# Altium schematic symbol library EasyLib.SchLib: 71 symbols
Pins are listed as number, name and electrical type; pins without a type are passive.

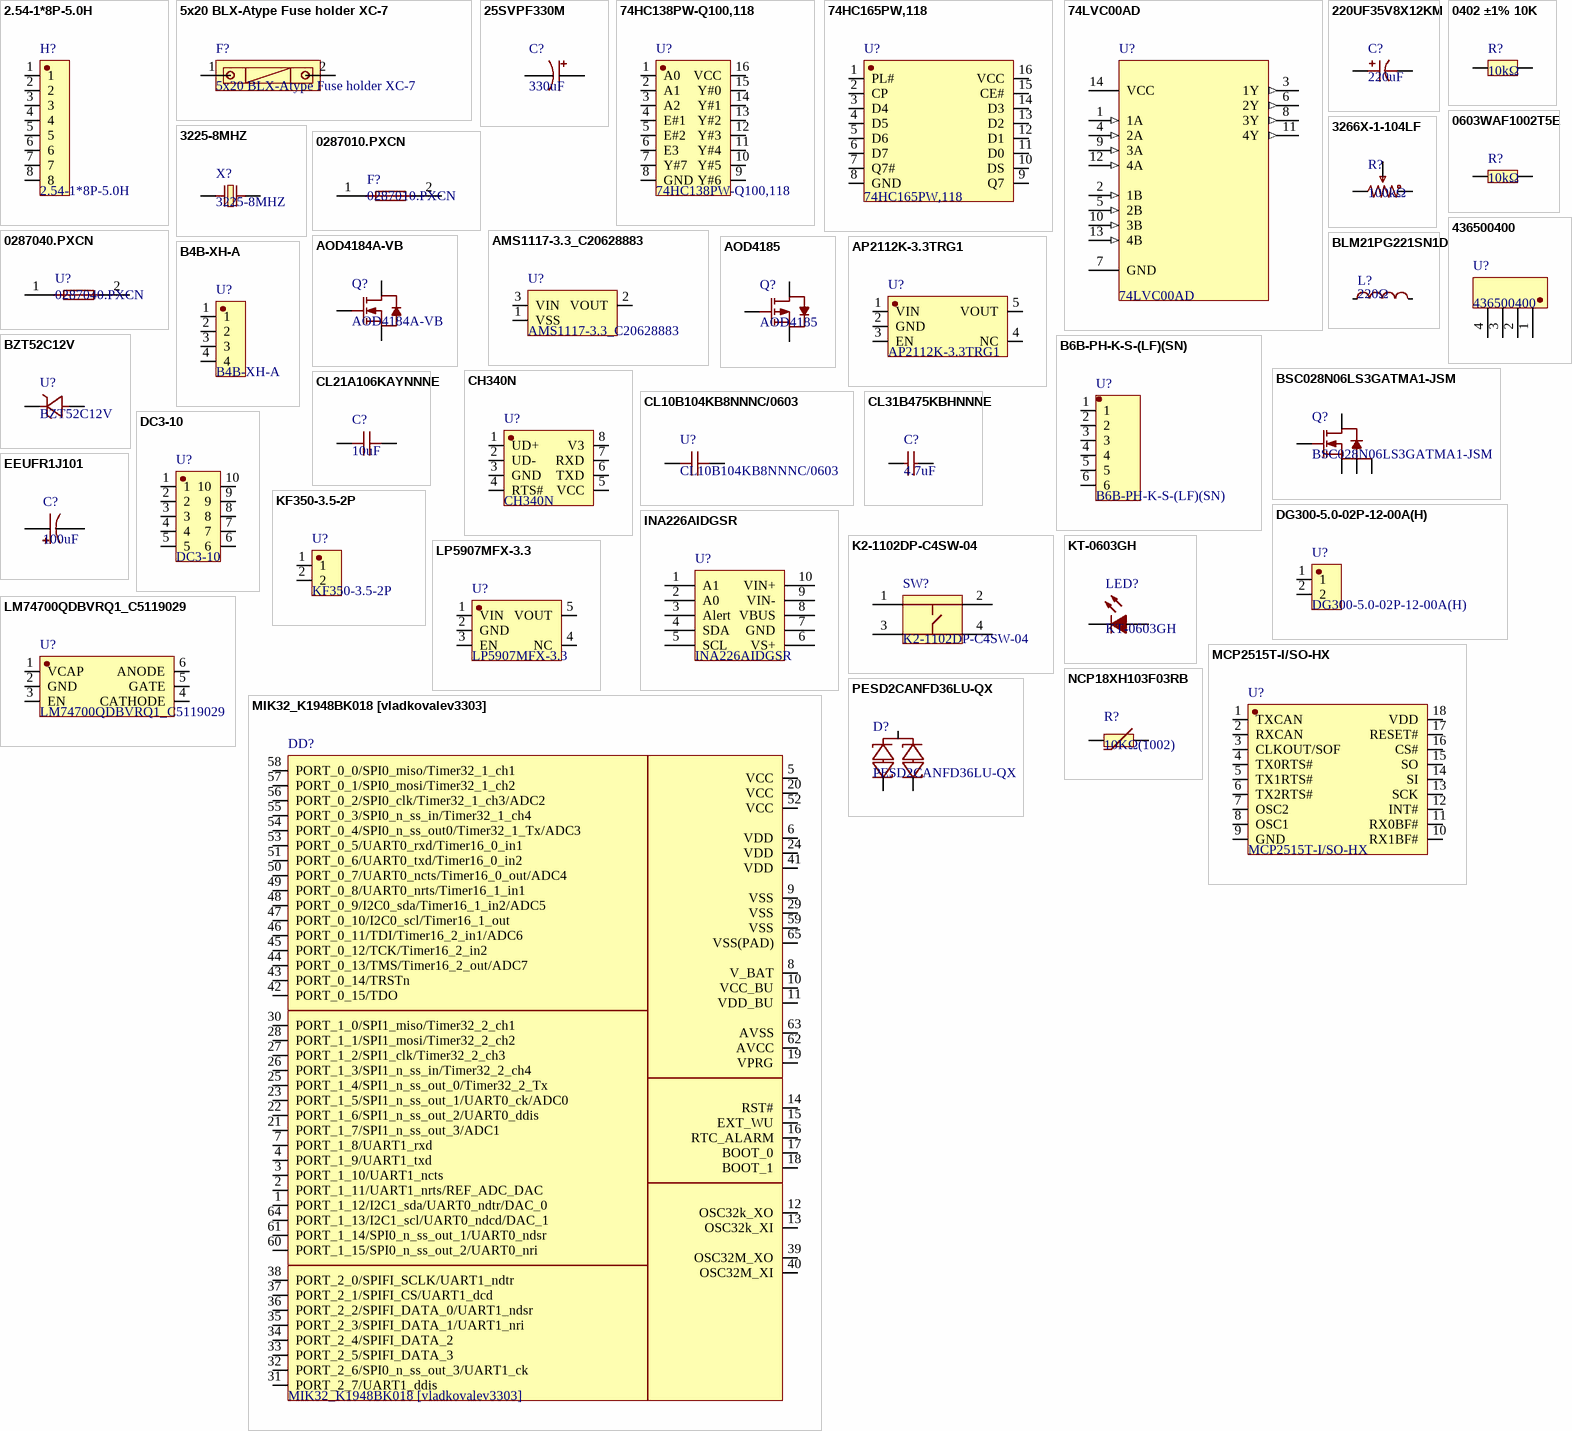
[diagram p0: symbols 2.54-1*8P-5.0H to PESD2CANFD36LU-QX]

## 2.54-1*8P-5.0H
designator H?
Manufacturer: BOOMELE; Manufacturer Part Number: 2.54-1*8P 5.0H; LCSC Part: C3014686; Supplier: LCSC; Supplier Part Number: C3014686; JLCPCB Part Class: Extended Part; Datasheet: https://www.lcsc.com/datasheet/C3014686.pdf; Source: JLCEDA/EasyEDA Official Library (https://easyeda.com, https://lceda.cn)
footprint HDR-TH_8P-P2.54-V-F-H5.0 (Footprint)
pins: 1, 2, 3, 4, 5, 6, 7, 8

## 5x20 BLX-Atype Fuse holder XC-7
designator F?
5x20 BLX-; Manufacturer: xcfuse; Manufacturer Part Number: 5x20 BLX-A XC-7; LCSC Part: C3131; Supplier: LCSC; Supplier Part Number: C3131; JLCPCB Part Class: Extended Part; Datasheet: https://www.lcsc.com/datasheet/C3131.pdf; LCSC URL: https://lcsc.com/product-detail/Fuseholders_5x20-BLX-Fuse-holder_C3131.html; Source: JLCEDA/EasyEDA Official Library (https://easyeda.com, https://lceda.cn)
footprint FUSE-TH_L22.6-W9.0 (Footprint)
pins: 1, 2

## 25SVPF330M
designator C?, comment 330uF
Manufacturer: PANASONIC; Manufacturer Part Number: 25SVPF330M; Value: 330uF; LCSC Part: C178367; Supplier: LCSC; Supplier Part Number: C178367; JLCPCB Part Class: Extended Part; Datasheet: https://www.lcsc.com/datasheet/C178367.pdf; LCSC URL: https://lcsc.com/product-detail/Solid-Polymer-Electrolytic-Capacitor_PANASONIC_25SVPF330M_330uF-25V_C178367.html; Source: JLCEDA/EasyEDA Official Library (https://easyeda.com, https://lceda.cn)
footprint CAP-SMD_BD10.0-L10.3-W10.3-LS11.0-FD (Footprint)
pins: 1, 2

## 74HC138PW-Q100,118
designator U?
Manufacturer: Nexperia; Manufacturer Part Number: 74HC138PW-Q100,118; LCSC Part: C546575; Supplier: LCSC; Supplier Part Number: C546575; JLCPCB Part Class: Extended Part; Datasheet: https://www.lcsc.com/datasheet/C546575.pdf; LCSC URL: https://lcsc.com/product-detail/presales_Nexperia-74HC138PW-Q100-118_C546575.html; Source: JLCEDA/EasyEDA Official Library (https://easyeda.com, https://lceda.cn)
footprint TSSOP-16_L5.0-W4.4-P0.65-LS6.4-BL (Footprint)
pins: 1 A0, 2 A1, 3 A2, 4 E#1, 5 E#2, 6 E3, 7 Y#7, 8 GND, 9 Y#6, 10 Y#5, 11 Y#4, 12 Y#3, 13 Y#2, 14 Y#1, 15 Y#0, 16 VCC

## 74HC165PW,118
designator U?
Manufacturer: Nexperia; Manufacturer Part Number: 74HC165PW,118; LCSC Part: C80696; Supplier: LCSC; Supplier Part Number: C80696; JLCPCB Part Class: Extended Part; Datasheet: https://www.lcsc.com/datasheet/C80696.pdf; LCSC URL: https://lcsc.com/product-detail/74-Series_NXP_74HC165PW_74HC165PW_C80696.html; Source: JLCEDA/EasyEDA Official Library (https://easyeda.com, https://lceda.cn)
footprint TSSOP-16_L5.0-W4.4-P0.65-LS6.4-BL (Footprint)
pins: 1 PL#, 2 CP, 3 D4, 4 D5, 5 D6, 6 D7, 7 Q7#, 8 GND, 9 Q7, 10 DS, 11 D0, 12 D1, 13 D2, 14 D3, 15 CE#, 16 VCC

## 74LVC00AD
designator U?
NAND Gate IC 4 Channel  14-SO; Manufacturer: NXP Semiconductors; Source: SnapEDA, imported from 74LVC00AD.zip; Manufacturer Part Number: 74LVC00AD; Datasheet: https://s3.amazonaws.com/snapeda/datasheet/74LVC00AD_NXP_Semiconductors.pdf
footprint SOIC127P600X175-14N (Footprint)
pins: 1 1A (in), 2 1B (in), 3 1Y (out), 4 2A (in), 5 2B (in), 6 2Y (out), 7 GND, 8 3Y (out), 9 3A (in), 10 3B (in), 11 4Y (out), 12 4A (in), 13 4B (in), 14 VCC (power)

## 220UF35V8X12KM
designator C?, comment 220uF
Manufacturer: Econd; Manufacturer Part Number: 220uF35V8x12KM; Value: 220uF; LCSC Part: C49304872; Supplier: LCSC; Supplier Part Number: C49304872; JLCPCB Part Class: Extended Part; Datasheet: https://www.lcsc.com/datasheet/C49304872.pdf; Source: JLCEDA/EasyEDA Official Library (https://easyeda.com, https://lceda.cn)
footprint CAP-TH_BD8.0-P3.50-D0.5-FD (Footprint)
pins: 1, 2

## 0402 ±1% 10K
designator R?, comment 10kΩ
Manufacturer: VO; Manufacturer Part Number: 0402 ±1% 10K; Value: 10kΩ; LCSC Part: C2889342; Supplier: LCSC; Supplier Part Number: C2889342; JLCPCB Part Class: Extended Part; Datasheet: https://www.lcsc.com/datasheet/C2889342.pdf; Source: JLCEDA/EasyEDA Official Library (https://easyeda.com, https://lceda.cn)
footprint R0402 (Footprint)
pins: 1, 2

## 0603WAF1002T5E
designator R?, comment 10kΩ
10KOhm (1002) ±1%; Manufacturer: UNI-ROYAL; Manufacturer Part Number: 0603WAF1002T5E; Value: 10kΩ; LCSC Part: C25804; Supplier: LCSC; Supplier Part Number: C25804; JLCPCB Part Class: Basic Part; Datasheet: https://www.lcsc.com/datasheet/C25804.pdf; LCSC URL: https://lcsc.com/product-detail/Chip-Resistor-Surface-Mount-UniOhm_10KR-1002-1_C25804.html; Source: JLCEDA/EasyEDA Official Library (https://easyeda.com, https://lceda.cn)
footprint R0603 (Footprint)
pins: 1, 2

## 3225-8MHZ
designator X?
Manufacturer Part Number: 3225-8MHz; LCSC Part: C9900007658; Supplier: LCSC; Supplier Part Number: C9900007658; JLCPCB Part Class: Extended Part; Datasheet: https://www.lcsc.com/datasheet/C9900007658.pdf; Source: JLCEDA/EasyEDA Official Library (https://easyeda.com, https://lceda.cn)
footprint CRYSTAL-SMD_L3.2-W2.5_3225-8MHZ (Footprint)
pins: 1, 2

## 3266X-1-104LF
designator R?, comment 100kΩ
Manufacturer: BOURNS; Manufacturer Part Number: 3266X-1-104LF; Value: 100kΩ; LCSC Part: C75886; Supplier: LCSC; Supplier Part Number: C75886; JLCPCB Part Class: Extended Part; Datasheet: https://www.lcsc.com/datasheet/C75886.pdf; Source: JLCEDA/EasyEDA Official Library (https://easyeda.com, https://lceda.cn)
footprint RES-ADJ-TH_3266X-1-103LF (Footprint)
pins: 1, 2, 3

## 0287010.PXCN
designator F?
Manufacturer: Littelfuse; Manufacturer Part Number: 0287010.PXCN; LCSC Part: C142683; Supplier: LCSC; Supplier Part Number: C142683; JLCPCB Part Class: Extended Part; Datasheet: https://www.lcsc.com/datasheet/C142683.pdf; Source: JLCEDA/EasyEDA Official Library (https://easyeda.com, https://lceda.cn)
footprint FUSE-TH_L19.1-W5.1 (Footprint)
pins: 1, 2

## 0287040.PXCN
designator U?
Manufacturer: Littelfuse; Manufacturer Part Number: 0287040.PXCN; LCSC Part: C142687; Supplier: LCSC; Supplier Part Number: C142687; JLCPCB Part Class: Extended Part; Datasheet: https://www.lcsc.com/datasheet/C142687.pdf; Source: JLCEDA/EasyEDA Official Library (https://easyeda.com, https://lceda.cn)
footprint FUSE-TH_L19.1-W5.1 (Footprint)
pins: 1, 2

## 436500400
designator U?
Manufacturer: MOLEX; Manufacturer Part Number: 436500400; LCSC Part: C277684; Supplier: LCSC; Supplier Part Number: C277684; JLCPCB Part Class: Extended Part; Datasheet: https://www.lcsc.com/datasheet/C277684.pdf; LCSC URL: https://lcsc.com/product-detail/Others_MOLEX_436500400_MOLEX-436500400_C277684.html; Source: JLCEDA/EasyEDA Official Library (https://easyeda.com, https://lceda.cn)
footprint CONN-TH_4P-P3.00_L8.9-W15.7-EH4.7 (Footprint)
pins: 1, 2, 3, 4

## AMS1117-3.3_C20628883
designator U?
Manufacturer: FOSAN; Manufacturer Part Number: AMS1117-3.3; LCSC Part: C20628883; Supplier: LCSC; Supplier Part Number: C20628883; JLCPCB Part Class: Extended Part; Datasheet: https://www.lcsc.com/datasheet/C20628883.pdf; Source: JLCEDA/EasyEDA Official Library (https://easyeda.com, https://lceda.cn)
footprint SOT-89-3_L4.5-W2.5-P1.50-LS4.1-BR-1 (Footprint)
pins: 1 VSS, 2 VOUT, 3 VIN

## AOD4184A-VB
designator Q?
Manufacturer: VBsemi; Manufacturer Part Number: AOD4184A-VB; LCSC Part: C7568791; Supplier: LCSC; Supplier Part Number: C7568791; JLCPCB Part Class: Extended Part; Datasheet: https://www.lcsc.com/datasheet/C7568791.pdf; Source: JLCEDA/EasyEDA Official Library (https://easyeda.com, https://lceda.cn)
footprint TO-252-2_L6.5-W6.1-P4.56-LS9.9-BR-CW-1 (Footprint)
pins: 1 G, 2 D, 3 S

## AOD4185
designator Q?
Manufacturer: AOS; Manufacturer Part Number: AOD4185L; LCSC Part: C77993; Supplier: LCSC; Supplier Part Number: C77993; JLCPCB Part Class: Extended Part; Datasheet: https://www.lcsc.com/datasheet/C77993.pdf; LCSC URL: https://lcsc.com/product-detail/MOSFET_AOS_AOD4185_AOD4185_C77993.html; Source: JLCEDA/EasyEDA Official Library (https://easyeda.com, https://lceda.cn)
footprint TO-252-3_L6.5-W5.8-P4.58-BL (Footprint)
pins: 1 G, 2 D, 3 S

## AP2112K-3.3TRG1
designator U?
Manufacturer: DIODES; Manufacturer Part Number: AP2112K-3.3TRG1; LCSC Part: C51118; Supplier: LCSC; Supplier Part Number: C51118; JLCPCB Part Class: Extended Part; Datasheet: https://www.lcsc.com/datasheet/C51118.pdf; LCSC URL: https://lcsc.com/product-detail/Low-Dropout-Regulators-LDO_DIODES_AP2112K-3-3TRG1_AP2112K-3-3TRG1_C51118.html; Source: JLCEDA/EasyEDA Official Library (https://easyeda.com, https://lceda.cn)
footprint SOT-25-5_L2.9-W1.6-P0.95-LS2.8-BL (Footprint)
pins: 1 VIN, 2 GND, 3 EN, 4 NC, 5 VOUT

## B4B-XH-A
designator U?
Manufacturer Part Number: B4B-XH-A; LCSC Part: C41422491; Supplier: LCSC; Supplier Part Number: C41422491; JLCPCB Part Class: Extended Part; Datasheet: https://www.lcsc.com/datasheet/C41422491.pdf; Source: JLCEDA/EasyEDA Official Library (https://easyeda.com, https://lceda.cn)
footprint CONN-TH_B4B-XH-A-LF-SN (Footprint)
pins: 1, 2, 3, 4

## B6B-PH-K-S-(LF)(SN)
designator U?
Manufacturer: JST Sales America; Manufacturer Part Number: B6B-PH-K-S-(LF)(SN); LCSC Part: C160289; Supplier: LCSC; Supplier Part Number: C160289; Datasheet: https://www.lcsc.com/datasheet/C160289.pdf; LCSC URL: https://lcsc.com/product-detail/_JST_B6B-PH-K-S-LF-SN_B6B-PH-K-S-LF-SN_C160289.html; Source: JLCEDA/EasyEDA Official Library (https://easyeda.com, https://lceda.cn)
footprint CONN-TH_B6B-PH-K-S-LF-SN (Footprint)
pins: 1, 2, 3, 4, 5, 6

## BLM21PG221SN1D
designator L?, comment 220Ω
220Ohm ±25% @100MHz 2A; Manufacturer: muRata; Manufacturer Part Number: BLM21PG221SN1D; Value: 220Ω; LCSC Part: C85840; Supplier: LCSC; Supplier Part Number: C85840; JLCPCB Part Class: Extended Part; Datasheet: https://www.lcsc.com/datasheet/C85840.pdf; LCSC URL: https://lcsc.com/product-detail/Ferrite-Beads-And-Chips_muRata_BLM21PG221SN1D_220R-25-at100MHz-2A_C85840.html; Source: JLCEDA/EasyEDA Official Library (https://easyeda.com, https://lceda.cn)
footprint L0805 (Footprint)
pins: 1, 2

## BSC028N06LS3GATMA1-JSM
designator Q?
Manufacturer: JSMSEMI; Manufacturer Part Number: BSC028N06LS3GATMA1-JSM; LCSC Part: C55106948; Supplier: LCSC; Supplier Part Number: C55106948; JLCPCB Part Class: Extended Part; Datasheet: https://www.lcsc.com/datasheet/C55106948.pdf; Source: JLCEDA/EasyEDA Official Library (https://easyeda.com, https://lceda.cn)
footprint TDSON-8_L5.9-W5.2-P1.27-BL (Footprint)
pins: 1 S, 2 S, 3 S, 4 G, 5 D

## BZT52C12V
designator U?
Manufacturer: JUXING; Manufacturer Part Number: BZT52C12V; LCSC Part: C5182293; Supplier: LCSC; Supplier Part Number: C5182293; JLCPCB Part Class: Extended Part; Datasheet: https://www.lcsc.com/datasheet/C5182293.pdf; Source: JLCEDA/EasyEDA Official Library (https://easyeda.com, https://lceda.cn)
footprint SOD-123_L2.7-W1.6-LS3.7-RD-1 (Footprint)
pins: 1 C, 2 A

## CH340N
designator U?
Manufacturer Part Number: CH340N; LCSC Part: C506813; Supplier: LCSC; Supplier Part Number: C506813; JLCPCB Part Class: Extended Part; Datasheet: https://www.lcsc.com/datasheet/C506813.pdf; LCSC URL: https://lcsc.com/product-detail/USB-ICs_WCH-Jiangsu-Qin-Heng-CH340N_C506813.html; Source: JLCEDA/EasyEDA Official Library (https://easyeda.com, https://lceda.cn)
footprint SOP-8_L5.0-W4.0-P1.27-LS6.0-BL (Footprint)
pins: 1 UD+, 2 UD-, 3 GND, 4 RTS#, 5 VCC, 6 TXD, 7 RXD, 8 V3

## CL10B104KB8NNNC/0603
designator U?
Manufacturer Part Number: CL10B104KB8NNNC/0603; LCSC Part: C9900007620; Supplier: LCSC; Supplier Part Number: C9900007620; Datasheet: https://www.lcsc.com/datasheet/C9900007620.pdf; Source: JLCEDA/EasyEDA Official Library (https://easyeda.com, https://lceda.cn)
footprint C0603 (Footprint)
pins: 1, 2

## CL21A106KAYNNNE
designator C?, comment 10uF
10uF (106) ±10% 25V; Manufacturer: SAMSUNG; Manufacturer Part Number: CL21A106KAYNNNE; Value: 10uF; LCSC Part: C15850; Supplier: LCSC; Supplier Part Number: C15850; JLCPCB Part Class: Basic Part; Datasheet: https://www.lcsc.com/datasheet/C15850.pdf; LCSC URL: https://lcsc.com/product-detail/Multilayer-Ceramic-Capacitors-MLCC-SMD-SMT_SAMSUNG_CL21A106KAYNNNE_10uF-106-10-25V_C15850.html; Source: JLCEDA/EasyEDA Official Library (https://easyeda.com, https://lceda.cn)
footprint C0805 (Footprint)
pins: 1, 2

## CL31B475KBHNNNE
designator C?, comment 4.7uF
4.7uF (475) ±10% 50V; Manufacturer: SAMSUNG; Manufacturer Part Number: CL31B475KBHNNNE; Value: 4.7uF; LCSC Part: C51205; Supplier: LCSC; Supplier Part Number: C51205; JLCPCB Part Class: Extended Part; Datasheet: https://www.lcsc.com/datasheet/C51205.pdf; LCSC URL: https://lcsc.com/product-detail/Multilayer-Ceramic-Capacitors-MLCC-SMD-SMT_SAMSUNG_CL31B475KBHNNNE_4-7uF-475-10-50V_C51205.html; Source: JLCEDA/EasyEDA Official Library (https://easyeda.com, https://lceda.cn)
footprint C1206 (Footprint)
pins: 1, 2

## DC3-10
designator U?
Manufacturer Part Number: DC3-10; LCSC Part: C9900013828; Supplier: LCSC; Supplier Part Number: C9900013828; JLCPCB Part Class: Extended Part; Datasheet: https://www.lcsc.com/datasheet/C9900013828.pdf; Source: JLCEDA/EasyEDA Official Library (https://easyeda.com, https://lceda.cn)
footprint CONN-TH_DC3-10PS (Footprint)
pins: 1, 2, 3, 4, 5, 6, 7, 8, 9, 10

## DG300-5.0-02P-12-00A(H)
designator U?
Manufacturer: DEGSON; Manufacturer Part Number: DG300-5.0-02P-12-00A(H); LCSC Part: C28071373; Supplier: LCSC; Supplier Part Number: C28071373; JLCPCB Part Class: Extended Part; Datasheet: https://www.lcsc.com/datasheet/C28071373.pdf; Source: JLCEDA/EasyEDA Official Library (https://easyeda.com, https://lceda.cn)
footprint CONN-TH_2P-P5.00_DG300-5.0-02P-13-00AH (Footprint)
pins: 1, 2

## EEUFR1J101
designator C?, comment 100uF
Manufacturer: PANASONIC; Manufacturer Part Number: EEUFR1J101; Value: 100uF; LCSC Part: C407952; Supplier: LCSC; Supplier Part Number: C407952; JLCPCB Part Class: Extended Part; Datasheet: https://www.lcsc.com/datasheet/C407952.pdf; LCSC URL: https://lcsc.com/product-detail/Aluminum-Electrolytic-Capacitors-Leaded_PANASONIC-EEUFR1J101_C407952.html; Source: JLCEDA/EasyEDA Official Library (https://easyeda.com, https://lceda.cn)
footprint CAP-TH_BD10.0-P5.00-D1.0-FD (Footprint)
pins: 1, 2

## INA226AIDGSR
designator U?
Manufacturer: TI; Manufacturer Part Number: INA226AIDGSR; LCSC Part: C49851; Supplier: LCSC; Supplier Part Number: C49851; JLCPCB Part Class: Extended Part; Datasheet: https://www.lcsc.com/datasheet/C49851.pdf; LCSC URL: https://lcsc.com/product-detail/PMIC-Current-Regulation_TI_INA226AIDGSR_INA226AIDGSR_C49851.html; Source: JLCEDA/EasyEDA Official Library (https://easyeda.com, https://lceda.cn)
footprint MSOP-10_L3.0-W3.0-P0.50-LS5.0-BL (Footprint)
pins: 1 A1, 2 A0, 3 Alert, 4 SDA, 5 SCL, 6 VS+, 7 GND, 8 VBUS, 9 VIN-, 10 VIN+

## K2-1102DP-C4SW-04
designator SW?
Manufacturer Part Number: K2-1102DP-C4SW-04; LCSC Part: C110153; Supplier: LCSC; Supplier Part Number: C110153; JLCPCB Part Class: Extended Part; Datasheet: https://www.lcsc.com/datasheet/C110153.pdf; LCSC URL: https://lcsc.com/product-detail/Tactile-Switches_Button6-6-5_C110153.html; Source: JLCEDA/EasyEDA Official Library (https://easyeda.com, https://lceda.cn)
footprint KEY-TH_4P-L6.0-W6.0-P4.50-LS6.50 (Footprint)
pins: 1, 2, 3, 4

## KF350-3.5-2P
designator U?
Manufacturer: KEFA; Manufacturer Part Number: KF350-3.5-2P; LCSC Part: C474892; Supplier: LCSC; Supplier Part Number: C474892; JLCPCB Part Class: Extended Part; Datasheet: https://www.lcsc.com/datasheet/C474892.pdf; LCSC URL: https://lcsc.com/product-detail/New-Quadratic-Unclassified-Data_Cixi-Kefa-Elec-KF350-3-5-2P_C474892.html; Source: JLCEDA/EasyEDA Official Library (https://easyeda.com, https://lceda.cn)
footprint CONN-TH_P3.50_KF350-3.5-2P (Footprint)
pins: 1, 2

## KT-0603GH
designator LED?
Manufacturer Part Number: KT-0603GH; LCSC Part: C9900005170; Supplier: LCSC; Supplier Part Number: C9900005170; JLCPCB Part Class: Extended Part; Datasheet: https://www.lcsc.com/datasheet/C9900005170.pdf; Source: JLCEDA/EasyEDA Official Library (https://easyeda.com, https://lceda.cn)
footprint LED0603-RD_GREEN (Footprint)
pins: 1 C, 2 A

## LM74700QDBVRQ1_C5119029
designator U?
Manufacturer Part Number: LM74700QDBVRQ1; LCSC Part: C5119029; Supplier: LCSC; Supplier Part Number: C5119029; Datasheet: https://www.lcsc.com/datasheet/C5119029.pdf; Source: JLCEDA/EasyEDA Official Library (https://easyeda.com, https://lceda.cn)
footprint SOT-23-6_L2.9-W1.6-P0.95-LS2.8-BR (Footprint)
pins: 1 VCAP, 2 GND, 3 EN, 4 CATHODE, 5 GATE, 6 ANODE

## LP5907MFX-3.3
designator U?
Manufacturer: TECH PUBLIC; Manufacturer Part Number: LP5907MFX-3.3; LCSC Part: C23380874; Supplier: LCSC; Supplier Part Number: C23380874; JLCPCB Part Class: Extended Part; Datasheet: https://www.lcsc.com/datasheet/C23380874.pdf; Source: JLCEDA/EasyEDA Official Library (https://easyeda.com, https://lceda.cn)
footprint SOT-23-5_L3.0-W1.7-P0.95-LS2.8-BR (Footprint)
pins: 1 VIN, 2 GND, 3 EN, 4 NC, 5 VOUT

## MCP2515T-I/SO-HX
designator U?
Manufacturer: ZHHXDZ; Manufacturer Part Number: MCP2515T-I/SO-HX; LCSC Part: C50345544; Supplier: LCSC; Supplier Part Number: C50345544; JLCPCB Part Class: Extended Part; Datasheet: https://www.lcsc.com/datasheet/C50345544.pdf; Source: JLCEDA/EasyEDA Official Library (https://easyeda.com, https://lceda.cn)
footprint SOP-18_L11.6-W7.5-P1.27-LS10.3-BL (Footprint)
pins: 1 TXCAN, 2 RXCAN, 3 CLKOUT/SOF, 4 TX0RTS#, 5 TX1RTS#, 6 TX2RTS#, 7 OSC2, 8 OSC1, 9 GND, 10 RX1BF#, 11 RX0BF#, 12 INT#, 13 SCK, 14 SI, 15 SO, 16 CS#, 17 RESET#, 18 VDD

## MIK32_K1948BK018 [vladkovalev3303]
designator DD?
Manufacturer: Mikron; Manufacturer Part Number: MCU32; EasyEDA Component: c698b5f0ec9d426a8ac2146e656034b7; Source: EasyEDA user library (author: vladkovalev3303), https://easyeda.com/component/c698b5f0ec9d426a8ac2146e656034b7
footprint QFN-64_MCU32_PROD (Footprint)
pins: 1 PORT_1_12/I2C1_sda/UART0_ndtr/DAC_0, 2 PORT_1_11/UART1_nrts/REF_ADC_DAC, 3 PORT_1_10/UART1_ncts, 4 PORT_1_9/UART1_txd, 5 VCC, 6 VDD, 7 PORT_1_8/UART1_rxd, 8 V_BAT, 9 VSS, 10 VCC_BU, 11 VDD_BU, 12 OSC32k_XO, 13 OSC32k_XI, 14 RST#, 15 EXT_WU, 16 RTC_ALARM, 17 BOOT_0, 18 BOOT_1, 19 VPRG, 20 VCC, 21 PORT_1_7/SPI1_n_ss_out_3/ADC1, 22 PORT_1_6/SPI1_n_ss_out_2/UART0_ddis, 23 PORT_1_5/SPI1_n_ss_out_1/UART0_ck/ADC0, 24 VDD, 25 PORT_1_4/SPI1_n_ss_out_0/Timer32_2_Tx, 26 PORT_1_3/SPI1_n_ss_in/Timer32_2_ch4, 27 PORT_1_2/SPI1_clk/Timer32_2_ch3, 28 PORT_1_1/SPI1_mosi/Timer32_2_ch2, 29 VSS, 30 PORT_1_0/SPI1_miso/Timer32_2_ch1, 31 PORT_2_7/UART1_ddis, 32 PORT_2_6/SPI0_n_ss_out_3/UART1_ck, 33 PORT_2_5/SPIFI_DATA_3, 34 PORT_2_4/SPIFI_DATA_2, 35 PORT_2_3/SPIFI_DATA_1/UART1_nri, 36 PORT_2_2/SPIFI_DATA_0/UART1_ndsr, 37 PORT_2_1/SPIFI_CS/UART1_dcd, 38 PORT_2_0/SPIFI_SCLK/UART1_ndtr, 39 OSC32M_XO, 40 OSC32M_XI, 41 VDD, 42 PORT_0_15/TDO, 43 PORT_0_14/TRSTn, 44 PORT_0_13/TMS/Timer16_2_out/ADC7, 45 PORT_0_12/TCK/Timer16_2_in2, 46 PORT_0_11/TDI/Timer16_2_in1/ADC6, 47 PORT_0_10/I2C0_scl/Timer16_1_out, 48 PORT_0_9/I2C0_sda/Timer16_1_in2/ADC5, 49 PORT_0_8/UART0_nrts/Timer16_1_in1, 50 PORT_0_7/UART0_ncts/Timer16_0_out/ADC4, 51 PORT_0_6/UART0_txd/Timer16_0_in2, 52 VCC, 53 PORT_0_5/UART0_rxd/Timer16_0_in1, 54 PORT_0_4/SPI0_n_ss_out0/Timer32_1_Tx/ADC3, 55 PORT_0_3/SPI0_n_ss_in/Timer32_1_ch4, 56 PORT_0_2/SPI0_clk/Timer32_1_ch3/ADC2, 57 PORT_0_1/SPI0_mosi/Timer32_1_ch2, 58 PORT_0_0/SPI0_miso/Timer32_1_ch1, 59 VSS, 60 PORT_1_15/SPI0_n_ss_out_2/UART0_nri, 61 PORT_1_14/SPI0_n_ss_out_1/UART0_ndsr, 62 AVCC, 63 AVSS, 64 PORT_1_13/I2C1_scl/UART0_ndcd/DAC_1, 65 VSS(PAD)

## NCP18XH103F03RB
designator R?, comment 10KΩ(1002)
Manufacturer: muRata; Manufacturer Part Number: NCP18XH103F03RB; Value: 10KΩ(1002); LCSC Part: C13564; Supplier: LCSC; Supplier Part Number: C13564; JLCPCB Part Class: Extended Part; Datasheet: https://www.lcsc.com/datasheet/C13564.pdf; LCSC URL: https://lcsc.com/product-detail/NTC-Thermistors_muRata_NCP18XH103F03RB_10KR-1002-1_C13564.html; Source: JLCEDA/EasyEDA Official Library (https://easyeda.com, https://lceda.cn)
footprint R0603 (Footprint)
pins: 1, 2

## PESD2CANFD36LU-QX
designator D?
Manufacturer: Nexperia; Manufacturer Part Number: PESD2CANFD36LU-QX; LCSC Part: C6147143; Supplier: LCSC; Supplier Part Number: C6147143; JLCPCB Part Class: Extended Part; Datasheet: https://www.lcsc.com/datasheet/C6147143.pdf; Source: JLCEDA/EasyEDA Official Library (https://easyeda.com, https://lceda.cn)
footprint SOT-323-3_L2.1-W1.3-P1.32-LS2.1-BR (Footprint)
pins: 1, 2, 3

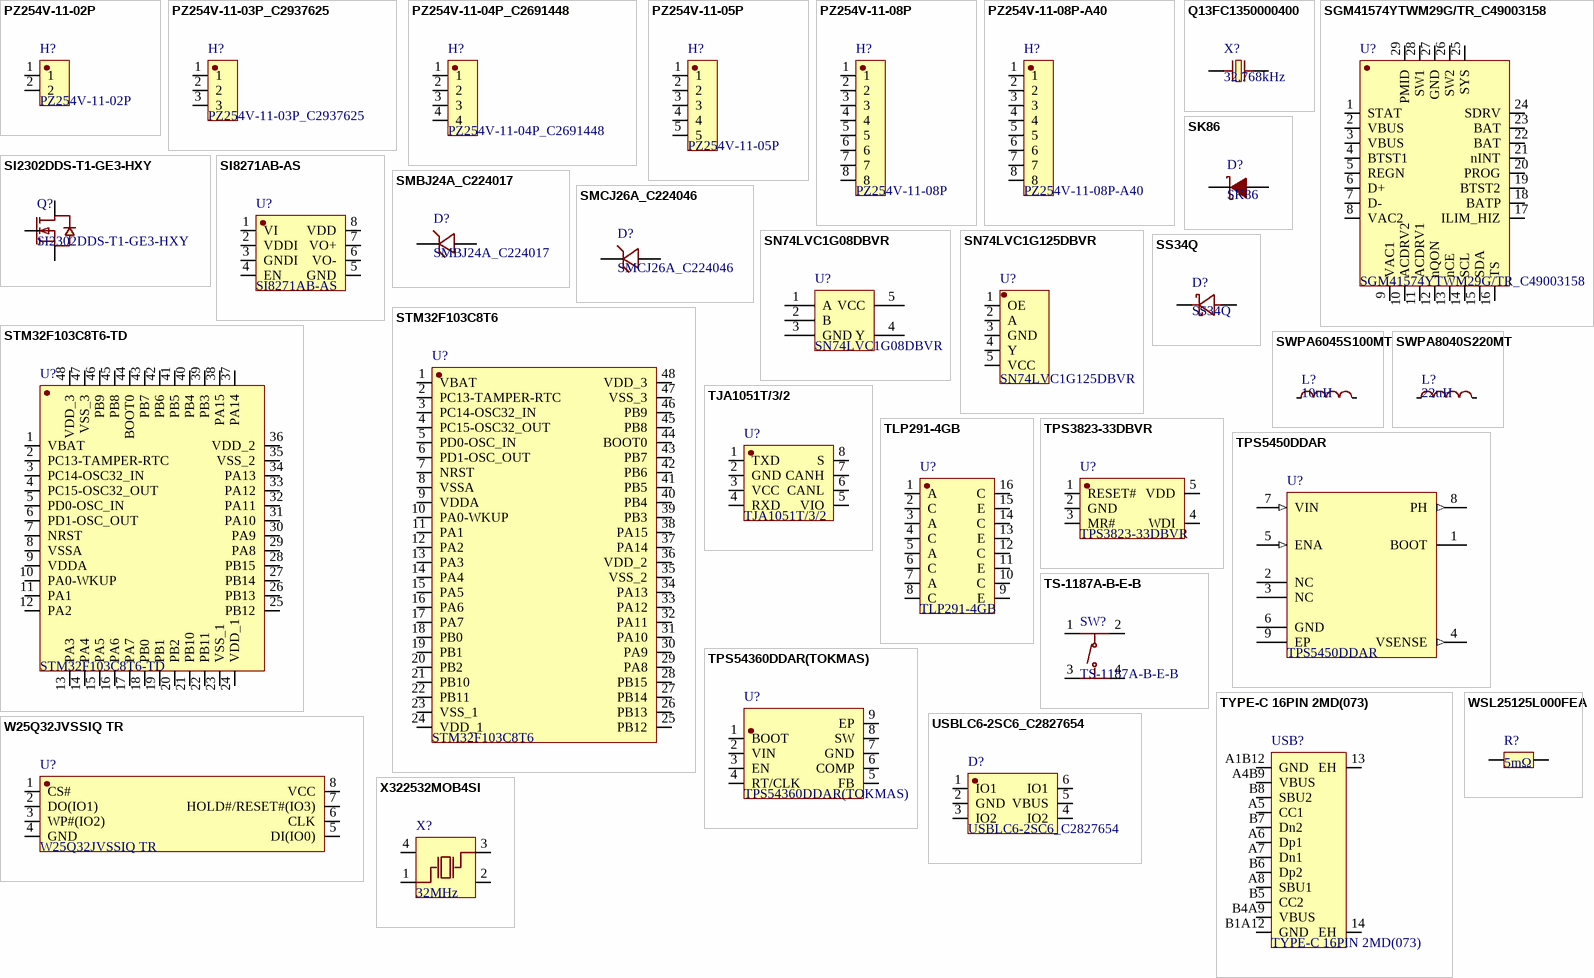
[diagram p1: symbols PZ254V-11-02P to X322532MOB4SI]

## PZ254V-11-02P
designator H?
Manufacturer: XFCN; Manufacturer Part Number: PZ254V-11-02P; LCSC Part: C492401; Supplier: LCSC; Supplier Part Number: C492401; JLCPCB Part Class: Extended Part; Datasheet: https://www.lcsc.com/datasheet/C492401.pdf; LCSC URL: https://lcsc.com/product-detail/New-Arrivals_XFCN-PZ254V-11-02P_C492401.html; Source: JLCEDA/EasyEDA Official Library (https://easyeda.com, https://lceda.cn)
footprint HDR-TH_2P-P2.54-V-M (Footprint)
pins: 1, 2

## PZ254V-11-03P_C2937625
designator H?
Manufacturer: XFCN; Manufacturer Part Number: PZ254V-11-03P; LCSC Part: C2937625; Supplier: LCSC; Supplier Part Number: C2937625; JLCPCB Part Class: Extended Part; Datasheet: https://www.lcsc.com/datasheet/C2937625.pdf; Source: JLCEDA/EasyEDA Official Library (https://easyeda.com, https://lceda.cn)
footprint HDR-TH_3P-P2.54-V-M_PZ254V-11-03P (Footprint)
pins: 1, 2, 3

## PZ254V-11-04P_C2691448
designator H?
Manufacturer: XFCN; Manufacturer Part Number: PZ254V-11-04P; LCSC Part: C2691448; Supplier: LCSC; Supplier Part Number: C2691448; JLCPCB Part Class: Extended Part; Datasheet: https://www.lcsc.com/datasheet/C2691448.pdf; Source: JLCEDA/EasyEDA Official Library (https://easyeda.com, https://lceda.cn)
footprint HDR-TH_4P-P2.54-V-M (Footprint)
pins: 1, 2, 3, 4

## PZ254V-11-05P
designator H?
Manufacturer: XFCN; Manufacturer Part Number: PZ254V-11-05P; LCSC Part: C492404; Supplier: LCSC; Supplier Part Number: C492404; JLCPCB Part Class: Extended Part; Datasheet: https://www.lcsc.com/datasheet/C492404.pdf; LCSC URL: https://lcsc.com/product-detail/New-Arrivals_XFCN-PZ254V-11-05P_C492404.html; Source: JLCEDA/EasyEDA Official Library (https://easyeda.com, https://lceda.cn)
footprint HDR-TH_5P-P2.54-V-M (Footprint)
pins: 1, 2, 3, 4, 5

## PZ254V-11-08P
designator H?
Manufacturer: XFCN; Manufacturer Part Number: PZ254V-11-08P; LCSC Part: C492407; Supplier: LCSC; Supplier Part Number: C492407; JLCPCB Part Class: Extended Part; Datasheet: https://www.lcsc.com/datasheet/C492407.pdf; LCSC URL: https://lcsc.com/product-detail/New-Arrivals_XFCN-PZ254V-11-08P_C492407.html; Source: JLCEDA/EasyEDA Official Library (https://easyeda.com, https://lceda.cn)
footprint HDR-TH_8P-P2.54-V-M (Footprint)
pins: 1, 2, 3, 4, 5, 6, 7, 8

## PZ254V-11-08P-A40
designator H?
Manufacturer: XFCN; Manufacturer Part Number: PZ254V-11-08P-A40; LCSC Part: C42419915; Supplier: LCSC; Supplier Part Number: C42419915; JLCPCB Part Class: Extended Part; Datasheet: https://www.lcsc.com/datasheet/C42419915.pdf; Source: JLCEDA/EasyEDA Official Library (https://easyeda.com, https://lceda.cn)
footprint HDR-TH_PZ254V-11-08P-A40 (Footprint)
pins: 1, 2, 3, 4, 5, 6, 7, 8

## Q13FC1350000400
designator X?, comment 32.768kHz
32.768KHz ±20ppm 12.5pF; Manufacturer: EPSON; Manufacturer Part Number: Q13FC13500004; Value: 32.768kHz; LCSC Part: C32346; Supplier: LCSC; Supplier Part Number: C32346; JLCPCB Part Class: Basic Part; Datasheet: https://www.lcsc.com/datasheet/C32346.pdf; LCSC URL: https://lcsc.com/product-detail/SMD-Crystals_EPSON_Q13FC1350000400_32-768KHz-20ppm-12-5pF_C32346.html; Source: JLCEDA/EasyEDA Official Library (https://easyeda.com, https://lceda.cn)
footprint FC-135R_L3.2-W1.5 (Footprint)
pins: 1, 2

## SGM41574YTWM29G/TR_C49003158
designator U?
Manufacturer Part Number: SGM41574YTWM29G/TR; LCSC Part: C49003158; Supplier: LCSC; Supplier Part Number: C49003158; JLCPCB Part Class: Extended Part; Datasheet: https://www.lcsc.com/datasheet/C49003158.pdf; Source: JLCEDA/EasyEDA Official Library (https://easyeda.com, https://lceda.cn)
footprint QFN-29_L4.0-W4.0-P0.40-TL-BQ25792RQMR (Footprint)
pins: 1 STAT, 2 VBUS, 3 VBUS, 4 BTST1, 5 REGN, 6 D+, 7 D-, 8 VAC2, 9 VAC1, 10 ACDRV2, 11 ACDRV1, 12 nQON, 13 nCE, 14 SCL, 15 SDA, 16 TS, 17 ILIM_HIZ, 18 BATP, 19 BTST2, 20 PROG, 21 nINT, 22 BAT, 23 BAT, 24 SDRV, 25 SYS, 26 SW2, 27 GND, 28 SW1, 29 PMID

## SI2302DDS-T1-GE3-HXY
designator Q?
Manufacturer: HXY MOSFET; Manufacturer Part Number: Si2302DDS-T1-GE3-HXY; LCSC Part: C22367242; Supplier: LCSC; Supplier Part Number: C22367242; JLCPCB Part Class: Extended Part; Datasheet: https://www.lcsc.com/datasheet/C22367242.pdf; Source: JLCEDA/EasyEDA Official Library (https://easyeda.com, https://lceda.cn)
footprint SOT-23-3_L2.9-W1.3-P1.90-LS2.4-BR-CW (Footprint)
pins: 1 G, 2 D, 3 S

## SI8271AB-AS
designator U?
Manufacturer: SKYWORKS; Manufacturer Part Number: SI8271AB-AS; LCSC Part: C17448387; Supplier: LCSC; Supplier Part Number: C17448387; JLCPCB Part Class: Extended Part; Datasheet: https://www.lcsc.com/datasheet/C17448387.pdf; Source: JLCEDA/EasyEDA Official Library (https://easyeda.com, https://lceda.cn)
footprint SOIC-8_L5.0-W4.0-P1.27-LS6.1-BL (Footprint)
pins: 1 VI, 2 VDDI, 3 GNDI, 4 EN, 5 GND, 6 VO-, 7 VO+, 8 VDD

## SK86
designator D?
Manufacturer: MDD; Manufacturer Part Number: SK86C; LCSC Part: C64338; Supplier: LCSC; Supplier Part Number: C64338; JLCPCB Part Class: Extended Part; Datasheet: https://www.lcsc.com/datasheet/C64338.pdf; LCSC URL: https://lcsc.com/product-detail/Schottky-Barrier-Diodes-SBD_SK86_C64338.html; Source: JLCEDA/EasyEDA Official Library (https://easyeda.com, https://lceda.cn)
footprint SMC_L7.1-W6.2-LS8.1-R-RD (Footprint)
pins: 1 A, 2 K

## SMBJ24A_C224017
designator D?
Manufacturer: Littelfuse; Manufacturer Part Number: SMBJ24A; LCSC Part: C224017; Supplier: LCSC; Supplier Part Number: C224017; JLCPCB Part Class: Extended Part; Datasheet: https://www.lcsc.com/datasheet/C224017.pdf; LCSC URL: https://lcsc.com/product-detail/Others_Littelfuse_SMBJ24A_Littelfuse-SMBJ24A_C224017.html; Source: JLCEDA/EasyEDA Official Library (https://easyeda.com, https://lceda.cn)
footprint SMB_L4.3-W3.6-LS5.4-RD (Footprint)
pins: 1, 2

## SMCJ26A_C224046
designator D?
Manufacturer: Littelfuse; Manufacturer Part Number: SMCJ26A; LCSC Part: C224046; Supplier: LCSC; Supplier Part Number: C224046; JLCPCB Part Class: Extended Part; Datasheet: https://www.lcsc.com/datasheet/C224046.pdf; LCSC URL: https://lcsc.com/product-detail/Others_Littelfuse_SMCJ26A_Littelfuse-SMCJ26A_C224046.html; Source: JLCEDA/EasyEDA Official Library (https://easyeda.com, https://lceda.cn)
footprint SMC_L6.9-W5.9-LS7.9-RD (Footprint)
pins: 1, 2

## SN74LVC1G08DBVR
designator U?
Manufacturer: TI; Manufacturer Part Number: SN74LVC1G08DBVR; LCSC Part: C7666; Supplier: LCSC; Supplier Part Number: C7666; JLCPCB Part Class: Extended Part; Datasheet: https://www.lcsc.com/datasheet/C7666.pdf; LCSC URL: https://lcsc.com/product-detail/74-Series_TI_SN74LVC1G08DBVRG4_SN74LVC1G08DBVRG4_C7666.html; Source: JLCEDA/EasyEDA Official Library (https://easyeda.com, https://lceda.cn)
footprint SOT-23-5_L3.0-W1.7-P0.95-LS2.8-BR (Footprint)
pins: 1 A, 2 B, 3 GND, 4 Y, 5 VCC

## SN74LVC1G125DBVR
designator U?
Manufacturer: TI; Manufacturer Part Number: SN74LVC1G125DBVR; LCSC Part: C23654; Supplier: LCSC; Supplier Part Number: C23654; JLCPCB Part Class: Extended Part; Datasheet: https://www.lcsc.com/datasheet/C23654.pdf; LCSC URL: https://lcsc.com/product-detail/74-Series_TI_SN74LVC1G125DBVR_SN74LVC1G125DBVR_C23654.html; Source: JLCEDA/EasyEDA Official Library (https://easyeda.com, https://lceda.cn)
footprint SOT-23-5_L3.0-W1.7-P0.95-LS2.8-BL (Footprint)
pins: 1 OE, 2 A, 3 GND, 4 Y, 5 VCC

## SS34Q
designator D?
Manufacturer: YANGJIE; Manufacturer Part Number: SS34Q; LCSC Part: C2942661; Supplier: LCSC; Supplier Part Number: C2942661; JLCPCB Part Class: Extended Part; Datasheet: https://www.lcsc.com/datasheet/C2942661.pdf; Source: JLCEDA/EasyEDA Official Library (https://easyeda.com, https://lceda.cn)
footprint SMC_L6.9-W5.9-LS7.9-RD (Footprint)
pins: 1 K, 2 A

## STM32F103C8T6
designator U?
ARM Cortex-M3 32-bit MCU, 64 KB Flash, 20 KB Internal RAM, 37 IOs, 48-pin LQFP, -40 to 85 degC, Tray; Manufacturer: ST; Manufacturer Part Number: STM32F103C8T6; LCSC Part: C8734; Supplier: LCSC; Supplier Part Number: C8734; JLCPCB Part Class: Extended Part; Datasheet: https://www.lcsc.com/datasheet/C8734.pdf; LCSC URL: https://lcsc.com/product-detail/ST-Microelectronics_STMicroelectronics_STM32F103C8T6_STM32F103C8T6_C8734.html; Source: JLCEDA/EasyEDA Official Library (https://easyeda.com, https://lceda.cn)
footprint LQFP-48_L7.0-W7.0-P0.50-LS9.0-BL (Footprint)
pins: 1 VBAT, 2 PC13-TAMPER-RTC, 3 PC14-OSC32_IN, 4 PC15-OSC32_OUT, 5 PD0-OSC_IN, 6 PD1-OSC_OUT, 7 NRST, 8 VSSA, 9 VDDA, 10 PA0-WKUP, 11 PA1, 12 PA2, 13 PA3, 14 PA4, 15 PA5, 16 PA6, 17 PA7, 18 PB0, 19 PB1, 20 PB2, 21 PB10, 22 PB11, 23 VSS_1, 24 VDD_1, 25 PB12, 26 PB13, 27 PB14, 28 PB15, 29 PA8, 30 PA9, 31 PA10, 32 PA11, 33 PA12, 34 PA13, 35 VSS_2, 36 VDD_2, 37 PA14, 38 PA15, 39 PB3, 40 PB4, 41 PB5, 42 PB6, 43 PB7, 44 BOOT0, 45 PB8, 46 PB9, 47 VSS_3, 48 VDD_3

## STM32F103C8T6-TD
designator U?
Manufacturer Part Number: STM32F103C8T6-TD; LCSC Part: C47108719; Supplier: LCSC; Supplier Part Number: C47108719; JLCPCB Part Class: Extended Part; Datasheet: https://www.lcsc.com/datasheet/C47108719.pdf; Source: JLCEDA/EasyEDA Official Library (https://easyeda.com, https://lceda.cn)
footprint LQFP-48_L7.0-W7.0-P0.50-LS9.0-TL (Footprint)
pins: 1 VBAT, 2 PC13-TAMPER-RTC, 3 PC14-OSC32_IN, 4 PC15-OSC32_OUT, 5 PD0-OSC_IN, 6 PD1-OSC_OUT, 7 NRST, 8 VSSA, 9 VDDA, 10 PA0-WKUP, 11 PA1, 12 PA2, 13 PA3, 14 PA4, 15 PA5, 16 PA6, 17 PA7, 18 PB0, 19 PB1, 20 PB2, 21 PB10, 22 PB11, 23 VSS_1, 24 VDD_1, 25 PB12, 26 PB13, 27 PB14, 28 PB15, 29 PA8, 30 PA9, 31 PA10, 32 PA11, 33 PA12, 34 PA13, 35 VSS_2, 36 VDD_2, 37 PA14, 38 PA15, 39 PB3, 40 PB4, 41 PB5, 42 PB6, 43 PB7, 44 BOOT0, 45 PB8, 46 PB9, 47 VSS_3, 48 VDD_3

## SWPA6045S100MT
designator L?, comment 10uH
10uH ±20%; Manufacturer: Sunlord; Manufacturer Part Number: SWPA6045S100MT; Value: 10uH; LCSC Part: C79272; Supplier: LCSC; Supplier Part Number: C79272; JLCPCB Part Class: Extended Part; Datasheet: https://www.lcsc.com/datasheet/C79272.pdf; LCSC URL: https://lcsc.com/product-detail/Power-Inductors_10uH-20_C79272.html; Source: JLCEDA/EasyEDA Official Library (https://easyeda.com, https://lceda.cn)
footprint IND-SMD_L6.0-W6.0_SWPA6045S (Footprint)
pins: 1, 2

## SWPA8040S220MT
designator L?, comment 22uH
22uH ±20%; Manufacturer: Sunlord; Manufacturer Part Number: SWPA8040S220MT; Value: 22uH; LCSC Part: C15857; Supplier: LCSC; Supplier Part Number: C15857; JLCPCB Part Class: Extended Part; Datasheet: https://www.lcsc.com/datasheet/C15857.pdf; LCSC URL: https://lcsc.com/product-detail/Power-Inductors_22uH-20_C15857.html; Source: JLCEDA/EasyEDA Official Library (https://easyeda.com, https://lceda.cn)
footprint IND-SMD_L8.0-W8.0 (Footprint)
pins: 1, 2

## TJA1051T/3/2
designator U?
Manufacturer Part Number: TJA1051T/3/2; LCSC Part: C5331912; Supplier: LCSC; Supplier Part Number: C5331912; JLCPCB Part Class: Extended Part; Datasheet: https://www.lcsc.com/datasheet/C5331912.pdf; Source: JLCEDA/EasyEDA Official Library (https://easyeda.com, https://lceda.cn)
footprint SOIC-8_L5.0-W4.0-P1.27-LS6.0-BL (Footprint)
pins: 1 TXD, 2 GND, 3 VCC, 4 RXD, 5 VIO, 6 CANL, 7 CANH, 8 S

## TLP291-4GB
designator U?
Manufacturer: ISOCOM LIMITED; Manufacturer Part Number: TLP291-4GB; LCSC Part: C36498892; Supplier: LCSC; Supplier Part Number: C36498892; Datasheet: https://www.lcsc.com/datasheet/C36498892.pdf; Source: JLCEDA/EasyEDA Official Library (https://easyeda.com, https://lceda.cn)
footprint SO-16_L10.3-W4.4-P1.27-LS7.0-BL (Footprint)
pins: 1 A, 2 C, 3 A, 4 C, 5 A, 6 C, 7 A, 8 C, 9 E, 10 C, 11 E, 12 C, 13 E, 14 C, 15 E, 16 C

## TPS3823-33DBVR
designator U?
Manufacturer: TI; Manufacturer Part Number: TPS3823-33DBVR; LCSC Part: C7719; Supplier: LCSC; Supplier Part Number: C7719; JLCPCB Part Class: Extended Part; Datasheet: https://www.lcsc.com/datasheet/C7719.pdf; LCSC URL: https://lcsc.com/product-detail/Microprocessor-Microcontroller-Supervisors_TI_TPS3823-33DBVR_TPS3823-33DBVR_C7719.html; Source: JLCEDA/EasyEDA Official Library (https://easyeda.com, https://lceda.cn)
footprint SOT-23-5_L3.0-W1.7-P0.95-LS2.8-BL (Footprint)
pins: 1 RESET#, 2 GND, 3 MR#, 4 WDI, 5 VDD

## TPS5450DDAR
designator U?
Manufacturer: TI; Manufacturer Part Number: TPS5450DDAR; LCSC Part: C114425; Supplier: LCSC; Supplier Part Number: C114425; JLCPCB Part Class: Extended Part; Datasheet: https://www.lcsc.com/datasheet/C114425.pdf; LCSC URL: https://lcsc.com/product-detail/DC-DC-Converters_TI_TPS5450DDAR_TPS5450DDAR_C114425.html; Source: JLCEDA/EasyEDA Official Library (https://easyeda.com, https://lceda.cn)
footprint SOP-8_L4.9-W3.9-P1.27-LS6.0-BL-EP (Footprint)
pins: 1 BOOT, 2 NC, 3 NC, 4 VSENSE (out), 5 ENA (in), 6 GND, 7 VIN (in), 8 PH (out), 9 EP

## TPS54360DDAR(TOKMAS)
designator U?
Manufacturer: Tokmas; Manufacturer Part Number: TPS54360DDAR(TOKMAS); LCSC Part: C7525413; Supplier: LCSC; Supplier Part Number: C7525413; JLCPCB Part Class: Extended Part; Datasheet: https://www.lcsc.com/datasheet/C7525413.pdf; Source: JLCEDA/EasyEDA Official Library (https://easyeda.com, https://lceda.cn)
footprint ESOP-8_L4.9-W3.9-P1.27-LS6.0-BL-EP (Footprint)
pins: 1 BOOT, 2 VIN, 3 EN, 4 RT/CLK, 5 FB, 6 COMP, 7 GND, 8 SW, 9 EP

## TS-1187A-B-E-B
designator SW?
Manufacturer: XKB Connection; Manufacturer Part Number: TS-1187A-B-E-B; LCSC Part: C2885180; Supplier: LCSC; Supplier Part Number: C2885180; JLCPCB Part Class: Extended Part; Datasheet: https://www.lcsc.com/datasheet/C2885180.pdf; Source: JLCEDA/EasyEDA Official Library (https://easyeda.com, https://lceda.cn)
footprint SW-SMD_TS-1187A-B-E-B (Footprint)
pins: 1 A, 2 B, 3 C, 4 D

## TYPE-C 16PIN 2MD(073)
designator USB?
Manufacturer: SHOU HAN; Manufacturer Part Number: TYPE-C 16PIN 2MD(073); LCSC Part: C2765186; Supplier: LCSC; Supplier Part Number: C2765186; JLCPCB Part Class: Extended Part; Datasheet: https://www.lcsc.com/datasheet/C2765186.pdf; Source: JLCEDA/EasyEDA Official Library (https://easyeda.com, https://lceda.cn)
footprint USB-C-SMD_TYPE-C-16PIN-2MD-073 (Footprint)
pins: 13 EH, 14 EH, A1B12 GND, A4B9 VBUS, A5 CC1, A6 Dp1, A7 Dn1, A8 SBU1, B1A12 GND, B4A9 VBUS, B5 CC2, B6 Dp2, B7 Dn2, B8 SBU2

## USBLC6-2SC6_C2827654
designator D?
Manufacturer: TECH PUBLIC; Manufacturer Part Number: USBLC6-2SC6; LCSC Part: C2827654; Supplier: LCSC; Supplier Part Number: C2827654; JLCPCB Part Class: Extended Part; Datasheet: https://www.lcsc.com/datasheet/C2827654.pdf; Source: JLCEDA/EasyEDA Official Library (https://easyeda.com, https://lceda.cn)
footprint SOT-23-6_L2.9-W1.6-P0.95-LS2.8-BL (Footprint)
pins: 1 IO1, 2 GND, 3 IO2, 4 IO2, 5 VBUS, 6 IO1

## W25Q32JVSSIQ TR
designator U?
Manufacturer: WINBOND; Manufacturer Part Number: W25Q32JVSSIQ TR; LCSC Part: C2441426; Supplier: LCSC; Supplier Part Number: C2441426; JLCPCB Part Class: Extended Part; Datasheet: https://www.lcsc.com/datasheet/C2441426.pdf; Source: JLCEDA/EasyEDA Official Library (https://easyeda.com, https://lceda.cn)
footprint SOIC-8_L5.2-W5.2-P1.27-LS7.9-BL (Footprint)
pins: 1 CS#, 2 DO(IO1), 3 WP#(IO2), 4 GND, 5 DI(IO0), 6 CLK, 7 HOLD#/RESET#(IO3), 8 VCC

## WSL25125L000FEA
designator R?, comment 5mΩ
Manufacturer: VISHAY; Manufacturer Part Number: WSL25125L000FEA; Value: 5mΩ; LCSC Part: C844900; Supplier: LCSC; Supplier Part Number: C844900; JLCPCB Part Class: Extended Part; Datasheet: https://www.lcsc.com/datasheet/C844900.pdf; Source: JLCEDA/EasyEDA Official Library (https://easyeda.com, https://lceda.cn)
footprint RES-SMD_L6.4-W3.2-R2512 (Footprint)
pins: 1, 2

## X322532MOB4SI
designator X?, comment 32MHz
YSX321SL 32MHZ 12PF 10PPM -40~+85; Manufacturer: YXC; Manufacturer Part Number: X322532MOB4SI; Value: 32MHz; LCSC Part: C9009; Supplier: LCSC; Supplier Part Number: C9009; JLCPCB Part Class: Extended Part; Datasheet: https://www.lcsc.com/datasheet/C9009.pdf; LCSC URL: https://lcsc.com/product-detail/SMD-Crystals_YSX321SL-32MHZ-12PF-10PPM-40-85_C9009.html; Source: JLCEDA/EasyEDA Official Library (https://easyeda.com, https://lceda.cn)
footprint CRYSTAL-SMD_4P-L3.2-W2.5-BL (Footprint)
pins: 1 OSC1, 2 GND, 3 OSC2, 4 GND